# Altium schematic symbol library pushbutton.SchLib: 1 symbol
Pins are listed as number, name and electrical type; pins without a type are passive.

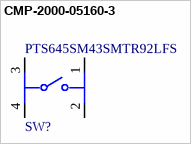
[diagram p0: symbol CMP-2000-05160-3]

## CMP-2000-05160-3
designator SW?, comment PTS645SM43SMTR92LFS
Switch Tactile N.O SPST Round Button Gull Wing 0.05A 12VDC 100000Cycle 1.57N SMD T/R; Manufacturer: C&K; Contact Resistance: 100mΩ; Throw Configuration: SPST-NO; Symbol Hash: e4f2503661fe04264f50fb928c13ad2fe87bcd91adbcb66dbad76167d37ba389; Verification Version: 0.0.0.3; Contact Current Rating: 50mA; Operating Force: 160gf; Voltage Rating Dc: 12V; Electromechanical Life: 100000Cycles; Switch Function: Off-Mom; Life (Cycles): 100kcycles; Actuator Material: Nylon, Polyamide; Number of Positions: 1; Actuator Length: 850µm; Illumination Type: Illuminated, Non-Illuminated; Insulation Resistance: 100GΩ; Mouser Part Number: 611-PTS645SM43SMTR92; Mouser Description: SWITCH TACTILE SPST-NO 0.05A 12V; Temperature Range High: +85°C; Part Number: PTS645SM43SMTR92LFS; Digikey Description: SWITCH TACTILE SPST-NO 0.05A 12V; Digikey Part Number: CKN9112CT-ND; ComponentLink2URL: https://www.ckswitches.com/media/1471/pts645.pdf; ComponentLink2Description: Datasheet; Lead Free: Yes; Height: 4.4mm; Automotive: No; Temperature Range Low: -20°C; RoHS: TRUE; Mount: Surface Mount; Package: 0; ComponentLink1Description: Upverter; Supplier 2: Mouser; Supplier 1: Digi-Key; ComponentLink1URL: https://upverter.com/part/id/2502ca7897830fb2/; Supplier Part Number 2: 611-PTS645SM43SMTR92; Supplier Part Number 1: CKN9112CT-ND; helpURL: https://upverter.com/part/id/2502ca7897830fb2/; Temperature: -20°C to +85°C; RoHS: Compliant; Electrical Life: 100kcycles; Lead Free: Lead Free; Contact Plating: Silver; Case/Package: SMD/SMT; Voltage Rating (DC): 12V; Termination: Solder; Max Current Rating: 50mA; Height: 3.45mm; Manufacturer Package Identifier: PTS645SM43SMTR92LFS; ComponentLink1URL: http://www.ck-components.com/; Max Voltage Rating (DC): 12V; Lifecycle Status: Production; Min Operating Temperature: -20°C; Throw Configuration: SPST; China RoHS: Compliant; ComponentLink1Description: Manufacturer's Website; Operating Force: 1.57N; Depth: 9mm; Contact Material: Silver; Length: 6mm; Current Rating: 50mA; Color: Black; Mechanical Life: 100kcycles; Orientation: Straight; Packaging: Cut Tape (CT); REACH SVHC: Yes; Max Operating Temperature: 60°C; ComponentLink2Description: Datasheet URL; HelpURL: https://www.ckswitches.com/media/1471/pts645.pdf
footprint PTS645SM43SMTR92LFS_MFG
footprint PTS645SM43SMTR92LFS_MFG (Recommended Land Pattern)
pins: 1, 2, 3, 4